# Altium schematic symbol library Centralize.SchLib: 1081 symbols (part 23 of 26)
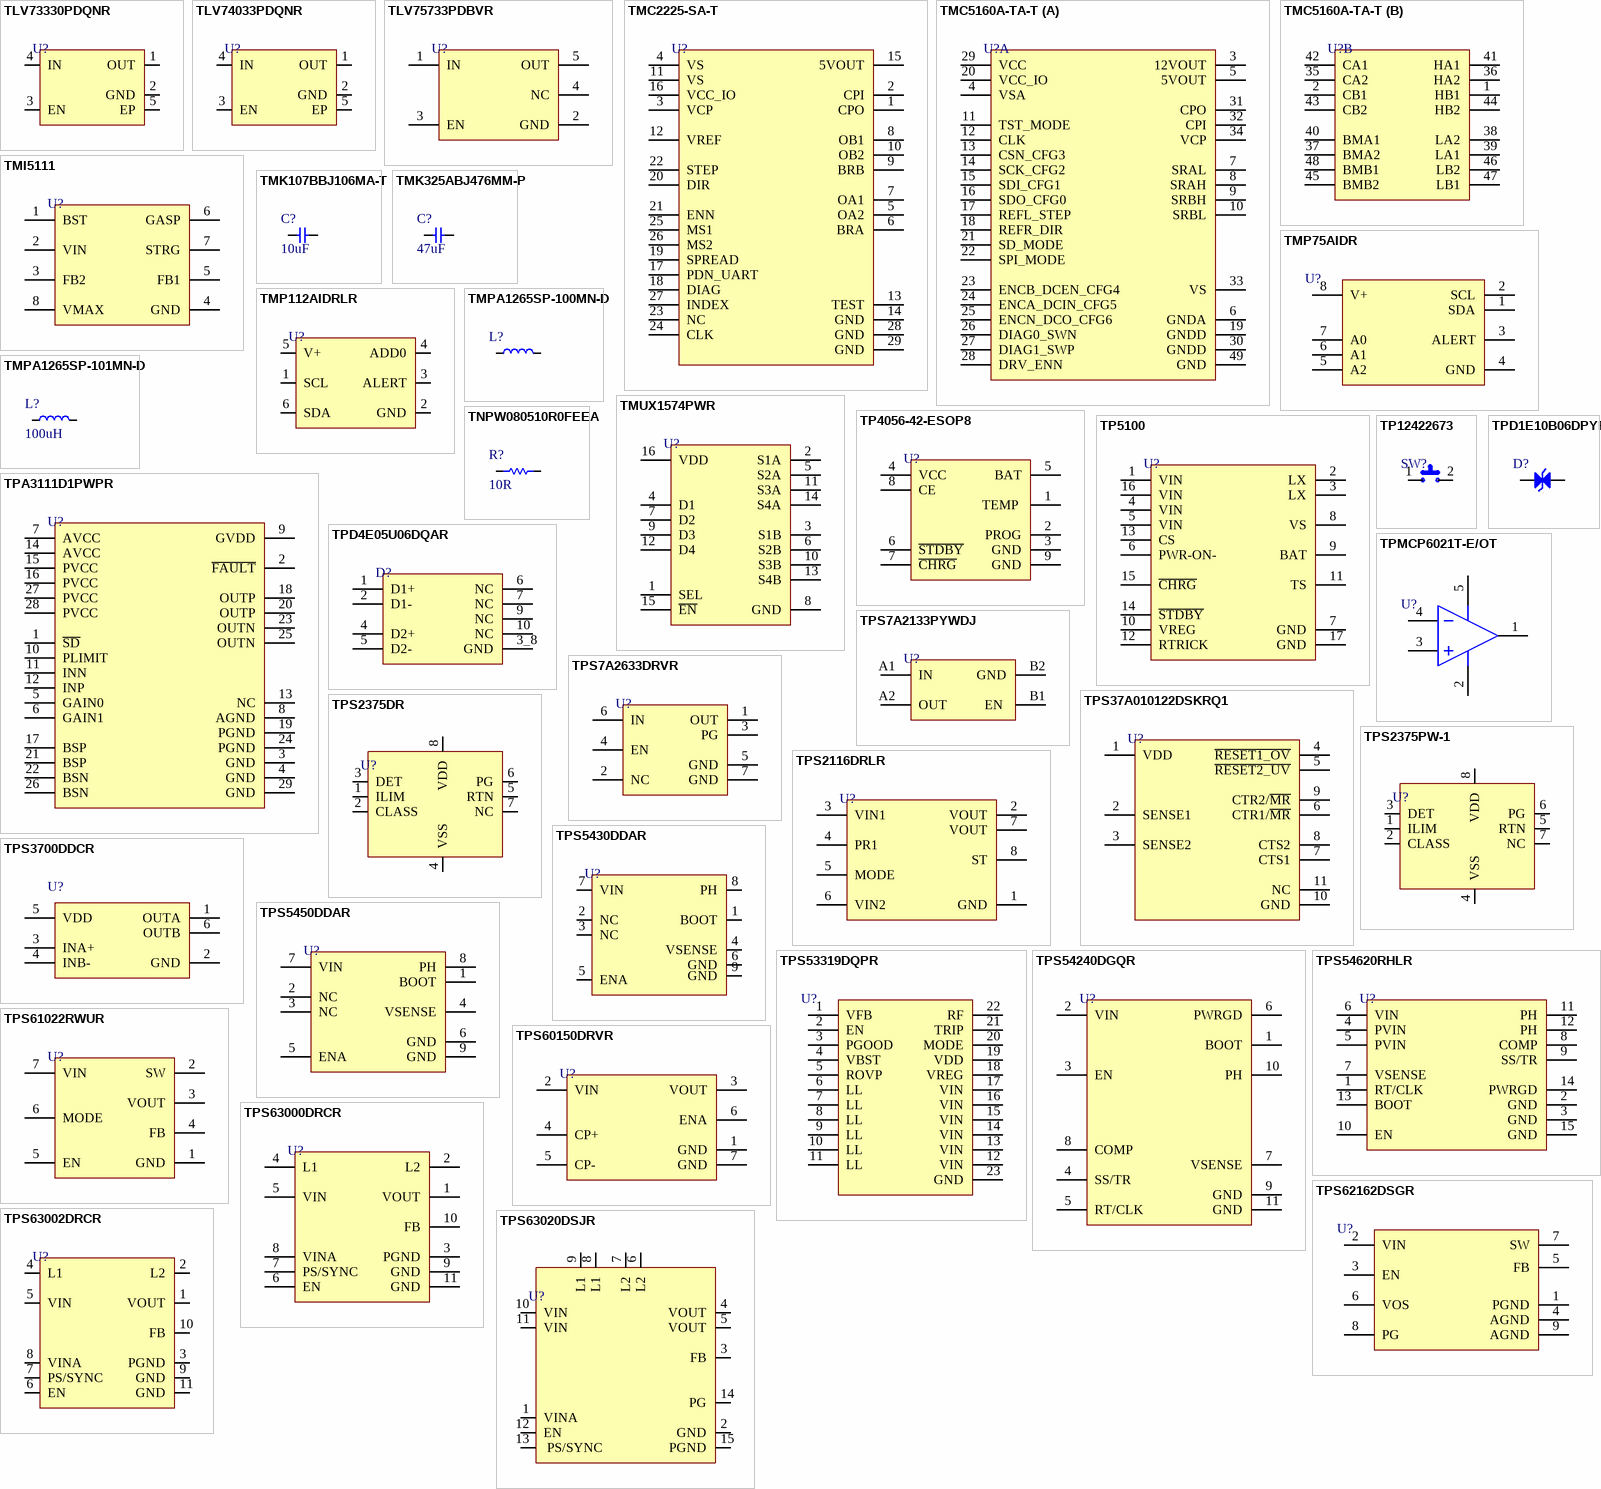
[diagram p69: symbols TLV73330PDQNR to TPS63020DSJR]

## TPS62162DSGR
designator U?
Buck Switching Regulator IC Positive Fixed 3.3V 1 Output 1A 8-WFDFN Exposed Pad; Manufacturer: Texas Instruments; Manufacturer Part Number: TPS62162DSGR; Number of Outputs: 1; Max Input Voltage: 17V; Min Input Voltage: 3V; Switching Frequency: 2.25MHz; Synchronous Rectifier: Yes; Quiescent Current: 17uA; Supplier 1: Mouser; RoHS: Yes; Category: Voltage Regulators - Switching; Pricing 1: 1=1.59000, 10=1.44000, 25=1.36000, 50=1.36000, 100=1.16000, 250=1.09000, 500=0.94700, 1000=0.78500, 10000=0.78400 (USD); Case/Package: SOIC; Number of Pins: 8; Contact Plating: Gold; Min Operating Temperature: -40°C; Max Operating Temperature: 125°C; Output Voltage: 3.3V; Packaging: Tape and Reel; Output Current: 1A; Package Quantity: 3000; Max Output Current: 1A; Min Output Voltage: 3.3V; Max Output Voltage: 3.3V; Operating Supply Voltage: 17V; Output Type: Fixed; Output Configuration: Positive; Series: DCS-Control™; Radiation Hardening: No; Lead Free: Lead Free; RoHS Compliant: Yes; ComponentLink1URL: https://datasheet.ciiva.com/2034/tps62161-2034675.pdf?src-supplier=Digi-Key; ComponentLink1Description: https://datasheet.ciiva.com/2034/tps62161-2034675.pdf?src-supplier=Digi-Key; Supplier Part Number 1: 595-TPS62162DSGR; LCSC Part Number: C40256; Item Type: IC
footprint 8-WSON(2x2) (IC REG BUCK 3.3V 1A 8WSON)
pins: 1 PGND, 2 VIN, 3 EN, 4 AGND, 5 FB, 6 VOS, 7 SW, 8 PG, 9 AGND

## TPS63000DRCR
designator U?
IC REG BCK BST ADJ 1.6A 10VSON; Manufacturer: Texas Instruments; Manufacturer Part Number: TPS63000DRCR; Output Voltage: 5.5V; Output Current: 1.2A; Efficiency: 96%; Number of Outputs: 1; Switching Frequency: 1.5MHz; Min Input Voltage: 1.8V; Synchronous Rectifier: Yes; Min Output Voltage: 1.2V; Quiescent Current: 40uA; Topology: Buck-Boost; Output Type: Adjustable; Supplier 1: Digi-Key; RoHS: Yes; Category: Voltage Regulators - Switching; Pricing 1: 1=2.68000, 10=2.40500, 25=2.26840, 100=1.93270, 250=1.81472, 500=1.58788, 1000=1.31567 (USD); Case/Package: VSON; Pins: 10; Weight: 0.000921oz; Min Operating Temperature: -40°C; Max Operating Temperature: 85°C; Packaging: Tape and Reel; Package Quantity: 1; Max Output current: 1.2A; Max Supply Voltage: 5.5V; Max Output Voltage: 5.5V; Series: -; Operating Supply Voltage: 5.5V; Radiation Hardening: No; Reach SVHC Compliant: Yes; Lead Free: Lead Free; RoHS Compliant: Yes; ComponentLink1URL: https://datasheet.ciiva.com/2025/tps63001-2025809.pdf?src-supplier=Digi-Key; ComponentLink1Description: https://datasheet.ciiva.com/2025/tps63001-2025809.pdf?src-supplier=Digi-Key; ComponentLink2URL: https://datasheet.ciiva.com/27052/1525749-27052325.pdf?src-supplier=Jameco; ComponentLink2Description: https://datasheet.ciiva.com/27052/1525749-27052325.pdf?src-supplier=Jameco; ComponentLink3URL: https://datasheet.ciiva.com/41462/001014937-da-01-en-ic-reg-buck-boo-tps63000drcr-vson-10-tid-41462784.pdf?src-supplier=Conrad; ComponentLink3Description: https://datasheet.ciiva.com/41462/001014937-da-01-en-ic-reg-buck-boo-tps63000drcr-vson-10-tid-41462784.pdf?src-supplier=Conrad; ComponentLink4URL: https://datasheet.ciiva.com/2025/tps63001-2025810.pdf?src-supplier=Digi-Key; ComponentLink4Description: https://datasheet.ciiva.com/2025/tps63001-2025810.pdf?src-supplier=Digi-Key; ComponentLink5URL: https://datasheet.ciiva.com/2025/tps63001-2025811.pdf?src-supplier=Digi-Key; ComponentLink5Description: https://datasheet.ciiva.com/2025/tps63001-2025811.pdf?src-supplier=Digi-Key; Supplier Part Number 1: 296-19641-6-ND; LCSC Part Number: C24966; Item Type: IC
footprint 10-VSON (3x3)
pins: 1 VOUT, 2 L2, 3 PGND, 4 L1, 5 VIN, 6 EN, 7 PS/SYNC, 8 VINA, 9 GND, 10 FB, 11 GND

## TPS63002DRCR
designator U?
IC REG BCK BST 5V 1.6A 10VSON; Manufacturer: Texas Instruments; Manufacturer Part Number: TPS63002DRCR; Number of Outputs: 1; Efficiency: 96%; Switching Frequency: 1.5MHz; Max Output current: 1.2A; Max Supply Voltage: 5.5V; Min Input Voltage: 1.8V; Synchronous Rectifier: Yes; Quiescent Current: 30uA; Topology: Buck-Boost; Output Type: Fixed; Output Configuration: Positive; Item Type: DFN-10(3x3); Supplier: Mouser; Supplier Part Number: 595-TPS63002DRCR; RoHS: Yes; Category: Voltage Regulators - Switching; Stock: 5060; Pricing: 1=2.51, 10=2.2, 50=2.2, 100=1.76, 1000=1.24, 10000=1.1 (USD); Case/Package: VSON; Pins: 10; Weight: 0.000921oz; Min Operating Temperature: -40°C; Max Operating Temperature: 85°C; Output Voltage: 5V; Operating Supply Voltage: 5.5V; Output Current: 1.2A; Packaging: Tape and Reel; Package Quantity: 3000; Nominal Output Voltage: 5V; Max Output Voltage: 5V; Min Output Voltage: 5V; Series: -; Reach SVHC Compliant: No; Lead Free: Lead Free; RoHS Compliant: Yes; ComponentLink1URL: https://datasheet.ciiva.com/22684/1831174-22684659.pdf?src-supplier=Element14; ComponentLink1Description: https://datasheet.ciiva.com/22684/1831174-22684659.pdf?src-supplier=Element14; ComponentLink2URL: https://datasheet.ciiva.com/14303/tps63001-14303726.pdf?src-supplier=Avnet; ComponentLink2Description: https://datasheet.ciiva.com/14303/tps63001-14303726.pdf?src-supplier=Avnet; ComponentLink3URL: https://datasheet.ciiva.com/2025/tps63001-2025822.pdf?src-supplier=Digi-Key; ComponentLink3Description: https://datasheet.ciiva.com/2025/tps63001-2025822.pdf?src-supplier=Digi-Key; ComponentLink4URL: https://datasheet.ciiva.com/2025/tps63001-2025821.pdf?src-supplier=Digi-Key; ComponentLink4Description: https://datasheet.ciiva.com/2025/tps63001-2025821.pdf?src-supplier=Digi-Key; ComponentLink5URL: https://datasheet.ciiva.com/2025/tps63001-2025823.pdf?src-supplier=Digi-Key; ComponentLink5Description: https://datasheet.ciiva.com/2025/tps63001-2025823.pdf?src-supplier=Digi-Key; LCSC Part Number: C116655
pins: 1 VOUT, 2 L2, 3 PGND, 4 L1, 5 VIN, 6 EN, 7 PS/SYNC, 8 VINA, 9 GND, 10 FB, 11 GND

## TPS63020DSJR
designator U?
IC REG BUCK-BST ADJ 3.5A 14VSON; Manufacturer: Texas Instruments; Manufacturer Part Number: TPS63020DSJR; Min Supply Voltage: 1.8V; Number of Outputs: 1; Output Voltage: 5.5V; Output Current: 3A; Efficiency: 96%; Switching Frequency: 2.4MHz; Min Output Voltage: 1.2V; Synchronous Rectifier: Yes; Quiescent Current: 50uA; Topology: Buck-Boost; Output Type: Adjustable; Output Configuration: Positive; Supplier: Mouser; Supplier Part Number: 595-TPS63020DSJR; RoHS: Yes; Category: Voltage Regulators - Switching; Stock: 18181; Pricing: 1=2.8, 10=2.43, 50=2.43, 100=2.07, 1000=1.46, 10000=1.36 (USD); Mounting Technology: Surface Mount; Case/Package: VSON; Pins: 14; Min Operating Temperature: -40°C; Max Operating Temperature: 85°C; Package Quantity: 3000; Packaging: Tape and Reel; Min Input Voltage: 1.8V; Max Output current: 3A; Max Supply Voltage: 5.5V; Max Output Voltage: 5.5V; Operating Supply Voltage: 5.5V; Series: -; Supply Current: 50uA; Reach SVHC Compliant: No; Lead Free: Lead Free; RoHS Compliant: Yes; ComponentLink1URL: https://datasheet.ciiva.com/29733/tps63021-29733058.pdf?src-supplier=Digi-Key; ComponentLink1Description: https://datasheet.ciiva.com/29733/tps63021-29733058.pdf?src-supplier=Digi-Key; ComponentLink2URL: https://datasheet.ciiva.com/29733/tps63020-29733142.pdf?src-supplier=Digi-Key; ComponentLink2Description: https://datasheet.ciiva.com/29733/tps63020-29733142.pdf?src-supplier=Digi-Key; ComponentLink3URL: https://datasheet.ciiva.com/3221/tps63020-3221509.pdf?src-supplier=Avnet; ComponentLink3Description: https://datasheet.ciiva.com/3221/tps63020-3221509.pdf?src-supplier=Avnet; LCSC Part Number: C15483; Item Type: IC
footprint 14-VSON (4x3)
pins: 1 VINA, 2 GND, 3 FB, 4 VOUT, 5 VOUT, 6 L2, 7 L2, 8 L1, 9 L1, 10 VIN, 11 VIN, 12 EN, 13  PS/SYNC, 14 PG, 15 PGND

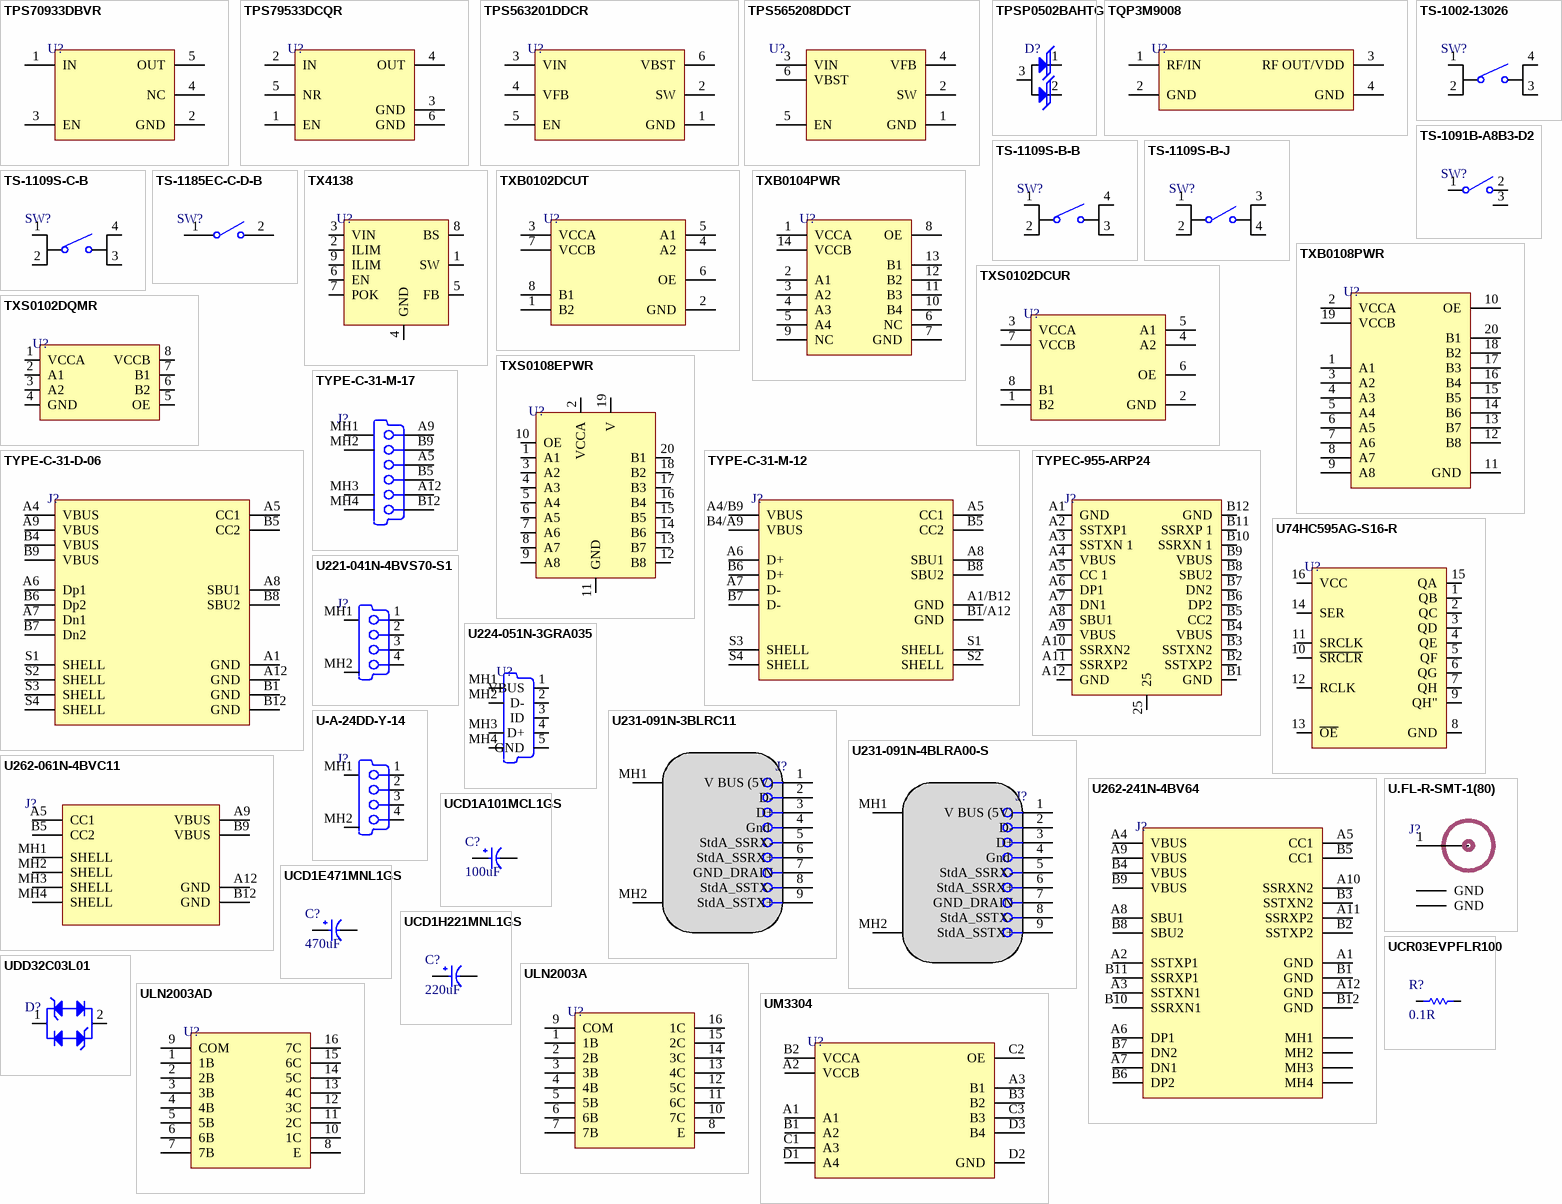
[diagram p43: symbols TPS70933DBVR to UM3304]

## TPS70933DBVR
designator U?
IC REG LINEAR 3.3V 150MA SOT23-5; Manufacturer: Texas Instruments; Manufacturer Part Number: TPS70933DBVR; Package: SOT-23-5; LCSC Part Number: C89347; Item Type: IC
footprint SOT-23-5
pins: 1 IN, 2 GND, 3 EN, 4 NC, 5 OUT

## TPS79533DCQR
designator U?
IC REG LIN 3.3V 500MA SOT223-6; Manufacturer: Texas Instruments; Manufacturer Part Number: TPS79533DCQR; Package: SOT-223-6; LCSC Part Number: C28669; Item Type: IC
footprint SOT-223-6_
pins: 1 EN, 2 IN, 3 GND, 4 OUT, 5 NR, 6 GND

## TPS563201DDCR
designator U?
IC REG BUCK ADJ 3A TSOT23-6; Manufacturer: Texas Instruments; Manufacturer Part Number: TPS563201DDCR; Number of Outputs: 1; Min Input Voltage: 4.5V; Max Input Voltage: 17V; Min Output Voltage: 768mV; Max Output Voltage: 7V; Switching Frequency: 580kHz; Synchronous Rectifier: Yes; Quiescent Current: 400uA; Output Type: Adjustable; Output Configuration: Positive; Supplier 1: Digi-Key; Stock 1: 0; Pricing 1: 1=0.92, 10=0.812, 25=0.7628, 100=0.5781, 250=0.492, 500=0.4674, 1000=0.3567 (USD); Mount: Surface Mount; Case/Package: SOT-23-6; Number of Pins: 6; Min Operating Temperature: -40°C; Max Operating Temperature: 125°C; Packaging: Tape and Reel; Output Current: 3A; Lead Free: Lead Free; ComponentLink1URL: http://www.ti.com/lit/ds/symlink/tps563201.pdf?src-supplier=Digi-Key; ComponentLink1Description: http://www.ti.com/lit/ds/symlink/tps563201.pdf?src-supplier=Digi-Key; ComponentLink2URL: http://www.ti.com/general/docs/suppproductinfo.tsp?distId=10&amp;gotoUrl=http%3A%2F%2Fwww.ti.com%2Flit%2Fgpn%2Ftps563201&src-supplier=Digi-Key; ComponentLink2Description: http://www.ti.com/general/docs/suppproductinfo.tsp?distId=10&amp;gotoUrl=http%3A%2F%2Fwww.ti.com%2Flit%2Fgpn%2Ftps563201&src-supplier=Digi-Key; ComponentLink3URL: http://www.ti.com/lit/gpn/tps563201?src-supplier=Mouser; ComponentLink3Description: http://www.ti.com/lit/gpn/tps563201?src-supplier=Mouser; Supplier Part Number 1: 296-47238-6-ND; LCSC Part Number: C116592; Item Type: IC
footprint SOT-23-6 THIN
pins: 1 GND, 2 SW, 3 VIN, 4 VFB, 5 EN, 6 VBST

## TPS565208DDCT
designator U?
IC REG BUCK ADJ 5A TSOT23-6; Manufacturer: Texas Instruments; Manufacturer Part Number: TPS565208DDCT; Output Type: Adjustable; Output Configuration: Positive; Number of Outputs: 1; Min Input Voltage: 4.5V; Max Input Voltage: 17V; Min Output Voltage: 760mV; Max Output Voltage: 7V; Switching Frequency: 500kHz; Synchronous Rectifier: Yes; Supplier 1: Digi-Key; Stock 1: 1895; Pricing 1: 1=1.75, 10=1.576, 25=1.4868, 100=1.2666 (USD); Mount: Surface Mount; Case/Package: SOT-23-6; Min Operating Temperature: -40°C; Max Operating Temperature: 125°C; Packaging: Tape and Reel; Output Current: 5A; RoHS Compliant: Yes; ComponentLink1URL: http://www.ti.com/lit/ds/symlink/tps565208.pdf?src-supplier=Farnell; ComponentLink1Description: http://www.ti.com/lit/ds/symlink/tps565208.pdf?src-supplier=Farnell; ComponentLink2URL: http://www.ti.com/lit/ds/symlink/tps565208.pdf?src-supplier=Digi-Key; ComponentLink2Description: http://www.ti.com/lit/ds/symlink/tps565208.pdf?src-supplier=Digi-Key; ComponentLink3URL: http://www.ti.com/lit/ds/symlink/tps565208.pdf?src-supplier=Newark; ComponentLink3Description: http://www.ti.com/lit/ds/symlink/tps565208.pdf?src-supplier=Newark; Supplier Part Number 1: 296-47502-6-ND; LCSC Part Number: C2072024; Item Type: IC
footprint SOT-23-6
pins: 1 GND, 2 SW, 3 VIN, 4 VFB, 5 EN, 6 VBST

## TPSP0502BAHTG
designator D?
SOT-23(TO-236) ESD Protection Devices ROHS; Manufacturer: TECH PUBLIC; Manufacturer Part Number: TPSP0502BAHTG; Package: SOT-23(TO-236); LCSC Part Number: C2827647; Item Type: ESD Protection; ComponentLink1Description: LCSC; ComponentLink1URL: https://www.lcsc.com/product-detail/ESD-Protection-Devices_TECH-PUBLIC-TPSP0502BAHTG_C2827647.html
footprint SOT-23 (TRANS NPN 40V 0.6A SOT23)
pins: 1 K, 2 K, 3 A

## TQP3M9008
designator U?
RF Amp Chip Single GP 4GHz 5.25V 4-Pin(3+Tab) SOT-89; Manufacturer: TriQuint; Manufacturer Part Number: TQP3M9008; Operating Supply Voltage: 5V; Number of Channels: 1; Min Supply Voltage: 4.75V; Operating Supply Current: 85mA; Test Frequency: 1.9GHz; Gain: 20.6dB; Operating Frequency: 50 MHz to 4 GHz; Supplier 1: Avnet; RoHS: Yes; Category: Uncategorized; Mount: Surface Mount; Case/Package: SOT-89; Number of Pins: 4; Weight: 0.004603oz; Min Operating Temperature: -40°C; Max Operating Temperature: 85°C; Packaging: Tape and Reel; Package Quantity: 1000; Frequency: 4GHz; Max Supply Voltage: 5.25V; Bandwidth: 1.9GHz; Series: TQP; Radiation Hardening: No; RoHS Compliant: Yes; ComponentLink1URL: https://datasheet.ciiva.com/8154/tqp3m9008-8154011.pdf?src-supplier=Avnet; ComponentLink1Description: https://datasheet.ciiva.com/8154/tqp3m9008-8154011.pdf?src-supplier=Avnet; ComponentLink2URL: https://datasheet.ciiva.com/15129/getdatasheetpartid-698761-15129568.pdf?src-supplier=Verical; ComponentLink2Description: https://datasheet.ciiva.com/15129/getdatasheetpartid-698761-15129568.pdf?src-supplier=Verical; Supplier Part Number 1: TQP3M9008
footprint SOT-89
pins: 1 RF/IN, 2 GND, 3 RF OUT/VDD, 4 GND

## TS-1002-13026
designator SW?
50mA Straight SPST 12V Plugin,6x6mm Tactile Switches ROHS; Manufacturer: XUNPU; Manufacturer Part Number: TS-1002-13026; Package: Plugin,6x6mm; LCSC Part Number: C455107; Item Type: Tactile Switch; ComponentLink1Description: LCSC; ComponentLink1URL: https://www.lcsc.com/product-detail/span-style-background-color-ff0-Tactile-span-Switches_XUNPU-TS-1002-13026_C455107.html
footprint TS-1002-13026
pins: 1, 2, 3, 4

## TS-1091B-A8B3-D2
designator SW?
NO Lying SPST 250gf@±30gf Plugin Tactile Switches ROHS; Manufacturer: Yuandi; Manufacturer Part Number: TS-1091B-A8B3-D2; Package: Plugin; LCSC Part Number: C557914; Item Type: Tactile Switch; ComponentLink1Description: LCSC; ComponentLink1URL: https://www.lcsc.com/product-detail/Tactile-Switches_Yuandi-TS-1091B-A8B3-D2_C557914.html
footprint TS-1091B-A8B3-D2
pins: 1, 2, 3

## TS-1109S-B-B
designator SW?
No NO 50mA 100000 Times 160gf 12V Brick nogging SPST SMD Tactile Switches ROHS; Manufacturer: XKB Connectivity; Manufacturer Part Number: TS-1109S-B-B; Package: SMD; LCSC Part Number: C480315; Item Type: Tactile Switch; ComponentLink1Description: LCSC; ComponentLink1URL: https://www.lcsc.com/product-detail/Tactile-Switches_XKB-Connectivity-TS-1109S-B-B_C480315.html
footprint TS-1109S-B-B
pins: 1, 2, 3, 4

## TS-1109S-B-J
designator SW?
No NO 50mA 4.5mm 100000 160gf 12V -30℃~+85℃ 4.5mm 8mm Black Round Button Brick nogging SPST SMD Tactile Switches ROHS; Manufacturer: XKB Connectivity; Manufacturer Part Number: TS-1109S-B-J; Item Type: Switch; Package: SMD; LCSC Part Number: C480323; ComponentLink1Description: LCSC; ComponentLink1URL: https://www.lcsc.com/product-detail/span-style-background-color-ff0-Tactile-span-Switches_XKB-Connectivity-TS-1109S-B-J_C480323.html
footprint TS-1109S-B-J_
pins: 1, 2, 3, 4

## TS-1109S-C-B
designator SW?
No NO 50mA 4.5mm 100000 260gf 12V -30℃~+85℃ 4.5mm 4.3mm Black Round Button Brick nogging SPST SMD Tactile Switches ROHS; Manufacturer: XKB Connectivity; Manufacturer Part Number: TS-1109S-C-B; Item Type: Switch; Package: Custom; LCSC Part Number: C381037; ComponentLink1Description: LCSC; ComponentLink1URL: https://www.lcsc.com/product-detail/Tactile-Switches_XKB-Connectivity-TS-1109S-C-B_C381037.html
footprint TS-1109S-C-B
pins: 1, 2, 3, 4

## TS-1185EC-C-D-B
designator SW?
3mm 2mm Round Button 50mA Top3.65mm SPST 12V SMD Tactile Switches; Manufacturer: XKB; Manufacturer Part Number: TS-1185EC-C-D-B; Footprint: Custom; ComponentLink1Description: LCSC; ComponentLink1URL: https://lcsc.com/product-detail/Tactile-Switches_XKB-Connectivity-TS-1185EC-C-D-B_C318893.html; LCSC Part Number: C318893
footprint TS-1185EC-C-D-B_
pins: 1, 2

## TX4138
designator U?
Step-down type SOIC-8-EP DC-DC Converters ROHS; Manufacturer: XDS; Manufacturer Part Number: TX4138; Item Type: IC; Package: SOIC-8-EP; LCSC Part Number: C329267; ComponentLink1Description: LCSC; ComponentLink1URL: https://www.lcsc.com/product-detail/DC-DC-Converters_XDS-TX4138_C329267.html
footprint 8-SOIC-EP
pins: 1 SW, 2 ILIM, 3 VIN, 4 GND, 5 FB, 6 EN, 7 POK, 8 BS, 9 ILIM

## TXB0102DCUT
designator U?
IC TRNSLTR BIDIRECTIONAL US8; Manufacturer: Texas Instruments; Manufacturer Part Number: TXB0102DCUT; Propagation Delay: 31ns; Min Supply Voltage: 1.65V; Max Supply Voltage: 5.5V; Data Rate: 100Mbps; Number of Channels: 2; Logic Function: Translator; Turn-On Delay Time: 7.4ns; High Level Output Current: -20uA; Low Level Output Current: 20uA; Output Type: 3-STATE; Output Current: 50mA; Supplier 1: Arrow Electronics; RoHS: Yes; Category: Integrated Circuits (ICs); Stock 1: 10; Pricing 1: 1=0.79330, 10=0.66470, 25=0.65820, 250=0.37450, 500=0.36200, 1000=0.29770, 2500=0.28440 (USD); Mount: Surface Mount; Case/Package: VSSOP; Number of Pins: 8; Weight: 0.000339oz; Contact Plating: Gold; Min Operating Temperature: -40°C; Max Operating Temperature: 85°C; Packaging: Tape and Reel; Package Quantity: 1; Number of Bits: 2; Series: -; Number of Inputs: 2; Length: 2.3mm; Width: 2mm; Height: 0.85mm; Radiation Hardening: No; Lead Free: Lead Free; RoHS Compliant: Yes; REACH SVHC: No SVHC; ComponentLink1URL: https://datasheet.ciiva.com/4226/sces641b-4226901.pdf?src-supplier=Arrow+Electronics; ComponentLink1Description: https://datasheet.ciiva.com/4226/sces641b-4226901.pdf?src-supplier=Arrow+Electronics; ComponentLink2URL: https://datasheet.ciiva.com/15096/getdatasheetpartid-226009-15096242.pdf?src-supplier=Verical; ComponentLink2Description: https://datasheet.ciiva.com/15096/getdatasheetpartid-226009-15096242.pdf?src-supplier=Verical; ComponentLink3URL: https://datasheet.ciiva.com/14287/txb0102-14287498.pdf?src-supplier=Avnet; ComponentLink3Description: https://datasheet.ciiva.com/14287/txb0102-14287498.pdf?src-supplier=Avnet; ComponentLink4URL: https://datasheet.ciiva.com/14287/txb0102-14287370.pdf?src-supplier=Avnet; ComponentLink4Description: https://datasheet.ciiva.com/14287/txb0102-14287370.pdf?src-supplier=Avnet; ComponentLink5URL: https://datasheet.ciiva.com/6619/txb0102-6619255.pdf?src-supplier=Digi-Key; ComponentLink5Description: https://datasheet.ciiva.com/6619/txb0102-6619255.pdf?src-supplier=Digi-Key; ComponentLink6URL: https://datasheet.ciiva.com/6619/txb0102-6619256.pdf?src-supplier=Digi-Key; ComponentLink6Description: https://datasheet.ciiva.com/6619/txb0102-6619256.pdf?src-supplier=Digi-Key; ComponentLink7URL: https://datasheet.ciiva.com/6619/txb0102-6619257.pdf?src-supplier=Digi-Key; ComponentLink7Description: https://datasheet.ciiva.com/6619/txb0102-6619257.pdf?src-supplier=Digi-Key; Supplier Part Number 1: TXB0102DCUT; LCSC Part Number: C2677366; Item Type: IC
footprint VSSOP-8(2x2.3x0.5)
pins: 1 B2, 2 GND, 3 VCCA, 4 A2, 5 A1, 6 OE, 7 VCCB, 8 B1

## TXB0104PWR
designator U?
IC TRANSLATOR BIDIR 14TSSOP; Manufacturer: Texas Instruments; Manufacturer Part Number: TXB0104PWR; Propagation Delay: 31ns; Min Supply Voltage: 1.2V; Max Supply Voltage: 5.5V; Data Rate: 100Mbps; Number of Channels: 4; Turn-On Delay Time: 7.4ns; High Level Output Current: -20uA; Low Level Output Current: 20uA; Quiescent Current: 3.5uA; Output Type: 3-STATE; Nominal Supply Current: 5uA; Number of Circuits: 1; Channel Type: Bidirectional; Supplier 1: Arrow Electronics; RoHS: Yes; Category: Voltage Level Shifters; Stock 1: 1658; Pricing 1: 1=1.50780, 10=1.39060, 25=1.29340, 100=1.11370, 250=1.03790, 500=0.97230, 1000=0.92410 (USD); Mount: Surface Mount; Case/Package: TSSOP; Number of Pins: 14; Weight: 0.002018oz; Min Operating Temperature: -40°C; Max Operating Temperature: 85°C; Packaging: Tape and Reel; Package Quantity: 2000; Logic Function: Translator; Number of Bits: 4; Series: -; Number of Inputs: 4; Output Current: 20uA; Length: 5mm; Width: 4.4mm; Height: 1.15mm; Radiation Hardening: No; Reach SVHC Compliant: Yes; Lead Free: Lead Free; RoHS Compliant: Yes; ComponentLink1URL: https://datasheet.ciiva.com/1508/1633692-1508723.pdf?src-supplier=Element14; ComponentLink1Description: https://datasheet.ciiva.com/1508/1633692-1508723.pdf?src-supplier=Element14; ComponentLink2URL: https://datasheet.ciiva.com/22653/1845221-22653354.pdf?src-supplier=Farnell; ComponentLink2Description: https://datasheet.ciiva.com/22653/1845221-22653354.pdf?src-supplier=Farnell; ComponentLink3URL: https://datasheet.ciiva.com/15096/getdatasheetpartid-48026-15096134.pdf?src-supplier=Verical; ComponentLink3Description: https://datasheet.ciiva.com/15096/getdatasheetpartid-48026-15096134.pdf?src-supplier=Verical; ComponentLink4URL: https://datasheet.ciiva.com/1508/1849862-1508724.pdf?src-supplier=Element14; ComponentLink4Description: https://datasheet.ciiva.com/1508/1849862-1508724.pdf?src-supplier=Element14; ComponentLink5URL: https://datasheet.ciiva.com/46395/1864432-46395886.pdf?src-supplier=Element14; ComponentLink5Description: https://datasheet.ciiva.com/46395/1864432-46395886.pdf?src-supplier=Element14; ComponentLink6URL: https://datasheet.ciiva.com/1899/txb0104-1899515.pdf?src-supplier=Digi-Key; ComponentLink6Description: https://datasheet.ciiva.com/1899/txb0104-1899515.pdf?src-supplier=Digi-Key; ComponentLink7URL: https://datasheet.ciiva.com/1899/txb0104-1899514.pdf?src-supplier=Digi-Key; ComponentLink7Description: https://datasheet.ciiva.com/1899/txb0104-1899514.pdf?src-supplier=Digi-Key; ComponentLink8URL: https://datasheet.ciiva.com/1899/txb0104-1899516.pdf?src-supplier=Digi-Key; ComponentLink8Description: https://datasheet.ciiva.com/1899/txb0104-1899516.pdf?src-supplier=Digi-Key; ComponentLink9URL: https://datasheet.ciiva.com/14287/txb0104-14287375.pdf?src-supplier=Avnet; ComponentLink9Description: https://datasheet.ciiva.com/14287/txb0104-14287375.pdf?src-supplier=Avnet; Supplier Part Number 1: TXB0104PWR; LCSC Part Number: C60708; Item Type: IC
footprint 14-TSSOP
pins: 1 VCCA, 2 A1, 3 A2, 4 A3, 5 A4, 6 NC, 7 GND, 8 OE, 9 NC, 10 B4, 11 B3, 12 B2, 13 B1, 14 VCCB

## TXB0108PWR
designator U?
IC 8-BIT TRNSTR 15KV ESD 20TSSOP; Manufacturer: Texas Instruments; Manufacturer Part Number: TXB0108PWR; Max Supply Voltage: 5.5V; Min Supply Voltage: 1.2V; Propagation Delay: 4ns; Output Current: 20uA; Data Rate: 100Mbps; Number of Channels: 8; Logic Function: Translator; High Level Output Current: -20uA; Turn-On Delay Time: 9.5ns; Quiescent Current: 3.5uA; Output Type: 3-STATE; Channel Type: Bidirectional; Number of Circuits: 1; Rise Time: 7.3ns; Supplier 1: Mouser; RoHS: Yes; Category: Logic ICs; Stock 1: 134319; Pricing 1: 1=1.73, 10=1.55, 50=1.47, 100=1.21, 1000=0.789, 10000=0.694 (USD); Mounting Technology: Surface Mount; Case/Package: TSSOP; Pins: 20; Weight: 0.002716oz; Min Operating Temperature: -40°C; Max Operating Temperature: 85°C; Packaging: Tape and Reel; Number of Bits: 8; Low Level Output Current: 20uA; Series: -; Package Quantity: 2000; Number of Inputs: 8; Termination: SMD/SMT; Length: 6.5mm; Width: 4.4mm; Height: 1.15mm; Radiation Hardening: No; Lead Free: Lead Free; RoHS Compliant: Yes; Reach SVHC Compliant: No; ComponentLink1URL: https://datasheet.ciiva.com/1508/1789049-1508727.pdf?src-supplier=Element14; ComponentLink1Description: https://datasheet.ciiva.com/1508/1789049-1508727.pdf?src-supplier=Element14; ComponentLink2URL: https://datasheet.ciiva.com/22653/1633674-22653426.pdf?src-supplier=Farnell; ComponentLink2Description: https://datasheet.ciiva.com/22653/1633674-22653426.pdf?src-supplier=Farnell; ComponentLink3URL: https://datasheet.ciiva.com/1628/txb0108-1628712.pdf?src-supplier=Newark; ComponentLink3Description: https://datasheet.ciiva.com/1628/txb0108-1628712.pdf?src-supplier=Newark; ComponentLink4URL: https://datasheet.ciiva.com/4834/sces643e-127095-4834434.pdf?src-supplier=Mouser; ComponentLink4Description: https://datasheet.ciiva.com/4834/sces643e-127095-4834434.pdf?src-supplier=Mouser; ComponentLink5URL: https://datasheet.ciiva.com/15096/getdatasheetpartid-189652-15096226.pdf?src-supplier=Verical; ComponentLink5Description: https://datasheet.ciiva.com/15096/getdatasheetpartid-189652-15096226.pdf?src-supplier=Verical; ComponentLink6URL: https://datasheet.ciiva.com/28499/1811182-28499660.pdf?src-supplier=Element14; ComponentLink6Description: https://datasheet.ciiva.com/28499/1811182-28499660.pdf?src-supplier=Element14; ComponentLink7URL: https://datasheet.ciiva.com/1899/txb0108-1899608.pdf?src-supplier=Digi-Key; ComponentLink7Description: https://datasheet.ciiva.com/1899/txb0108-1899608.pdf?src-supplier=Digi-Key; ComponentLink8URL: https://datasheet.ciiva.com/1899/txb0108-1899607.pdf?src-supplier=Digi-Key; ComponentLink8Description: https://datasheet.ciiva.com/1899/txb0108-1899607.pdf?src-supplier=Digi-Key; ComponentLink9URL: https://datasheet.ciiva.com/1899/txb0108-1899609.pdf?src-supplier=Digi-Key; ComponentLink9Description: https://datasheet.ciiva.com/1899/txb0108-1899609.pdf?src-supplier=Digi-Key; ComponentLink10URL: https://datasheet.ciiva.com/14287/txb0108-14287509.pdf?src-supplier=Avnet; ComponentLink10Description: https://datasheet.ciiva.com/14287/txb0108-14287509.pdf?src-supplier=Avnet; ComponentLink11URL: https://datasheet.ciiva.com/48701/001073833-da-01-en-ic-8-bit-trnstr-txb0108pwr-tssop-20-tid-48701979.pdf?src-supplier=Conrad; ComponentLink11Description: https://datasheet.ciiva.com/48701/001073833-da-01-en-ic-8-bit-trnstr-txb0108pwr-tssop-20-tid-48701979.pdf?src-supplier=Conrad; Supplier Part Number 1: 595-TXB0108PWR; LCSC Part Number: C53406; Item Type: IC
footprint TSSOP-20
pins: 1 A1 "Input/output 1. Referenced to VCCA.", 2 VCCA "A-port supply voltage. 1.1 V =< VCCA =< 3.6 V, VCCA =< VCCB.", 3 A2 "Input/output 2. Referenced to VCCA.", 4 A3 "Input/output 3. Referenced to VCCA.", 5 A4 "Input/output 4. Referenced to VCCA.", 6 A5 "Input/output 5. Referenced to VCCA.", 7 A6 "Input/output 6. Referenced to VCCA.", 8 A7 "Input/output 7. Referenced to VCCA.", 9 A8 "Input/output 8. Referenced to VCCA.", 10 OE "Output enable. Pull OE low to place all outputs in 3-state mode. Referenced to VCCA.", 11 GND "Ground", 12 B8 "Input/output 8. Referenced to VCCB.", 13 B7 "Input/output 7. Referenced to VCCB.", 14 B6 "Input/output 6. Referenced to VCCB.", 15 B5 "Input/output 5. Referenced to VCCB.", 16 B4 "Input/output 4. Referenced to VCCB.", 17 B3 "Input/output 3. Referenced to VCCB.", 18 B2 "Input/output 2. Referenced to VCCB.", 19 VCCB "B-port supply voltage. 1.65 V =< VCCB =< 5.5 V.", 20 B1 "Input/output 1. Referenced to VCCB."

## TXS0102DCUR
designator U?
IC TRANSLTR BIDIRECTIONAL 8VSSOP; Manufacturer: Texas Instruments; Manufacturer Part Number: TXS0102DCUR; Package Body Material: Plastic; Interface IC Type: INTERFACE CIRCUIT; Channels: 1; Max Supply Voltage: 3.6V; Min Supply Voltage: 1.65V; Nominal Supply Voltage: 1.8V; Power Supplies: 1.8/3.3,2.5/5V; Supply Voltage1-Max: 5.5V; Supply Voltage1-Min: 2.3V; Supply Voltage1-Nom: 2.5V; Qualification Status: Not Qualified; Supplier 1: Mouser; RoHS: Yes; Category: Voltage Level Shifters; Stock 1: 246792; Pricing 1: 1=0.93000, 10=0.83300, 50=0.79000, 100=0.64900, 1000=0.42300, 10000=0.40900 (USD); Case/Package: VSSOP; Pins: 8; Package Shape: Rectangular; Terminal Finish: Nickel; Min Operating Temperature: -40°C; Max Operating Temperature: 85°C; JESD-609 Code: e4; JESD-30 Code: R-PDSO-G8; Moisture Sensitivity Level: 1; Package Style: SMALL OUTLINE, VERY THIN PROFILE, SHRINK PITCHMeter; Peak Reflow Temperature (Cel): 260°C; Surface Mount: Yes; Terminal Form: Gull Wing; Terminal Position: DUAL; Length: 2.3mm; Width: 2mm; Height - Seated (Max): 0.9mm; Terminal Pitch: 0.5mm; Temperature Grade: INDUSTRIAL; Reach SVHC Compliant: Yes; RoHS Compliant: Yes; ComponentLink1URL: https://www.ti.com:443/lit/ds/symlink/txs0102.pdf?src-supplier=IHS+Markit; ComponentLink1Description: https://www.ti.com:443/lit/ds/symlink/txs0102.pdf?src-supplier=IHS+Markit; ComponentLink2URL: https://datasheet.ciiva.com/22653/1846850-22653373.pdf?src-supplier=Farnell; ComponentLink2Description: https://datasheet.ciiva.com/22653/1846850-22653373.pdf?src-supplier=Farnell; ComponentLink3URL: https://datasheet.ciiva.com/15096/getdatasheetpartid-118249-15096172.pdf?src-supplier=Verical; ComponentLink3Description: https://datasheet.ciiva.com/15096/getdatasheetpartid-118249-15096172.pdf?src-supplier=Verical; ComponentLink4URL: https://datasheet.ciiva.com/1508/1857232-1508821.pdf?src-supplier=Element14; ComponentLink4Description: https://datasheet.ciiva.com/1508/1857232-1508821.pdf?src-supplier=Element14; ComponentLink5URL: https://datasheet.ciiva.com/28499/1863639-28499676.pdf?src-supplier=Element14; ComponentLink5Description: https://datasheet.ciiva.com/28499/1863639-28499676.pdf?src-supplier=Element14; ComponentLink6URL: https://datasheet.ciiva.com/46395/1863639-46395871.pdf?src-supplier=Element14; ComponentLink6Description: https://datasheet.ciiva.com/46395/1863639-46395871.pdf?src-supplier=Element14; ComponentLink7URL: https://datasheet.ciiva.com/1899/txs0102-1899369.pdf?src-supplier=Digi-Key; ComponentLink7Description: https://datasheet.ciiva.com/1899/txs0102-1899369.pdf?src-supplier=Digi-Key; ComponentLink8URL: https://datasheet.ciiva.com/1899/txs0102-1899368.pdf?src-supplier=Digi-Key; ComponentLink8Description: https://datasheet.ciiva.com/1899/txs0102-1899368.pdf?src-supplier=Digi-Key; ComponentLink9URL: https://datasheet.ciiva.com/1899/txs0102-1899370.pdf?src-supplier=Digi-Key; ComponentLink9Description: https://datasheet.ciiva.com/1899/txs0102-1899370.pdf?src-supplier=Digi-Key; ComponentLink10URL: https://datasheet.ciiva.com/14287/txs0102-14287516.pdf?src-supplier=Avnet; ComponentLink10Description: https://datasheet.ciiva.com/14287/txs0102-14287516.pdf?src-supplier=Avnet; Supplier Part Number 1: 595-TXS0102DCUR; LCSC Part Number: C53434; Item Type: IC
footprint 8-VSSOP
pins: 1 B2, 2 GND, 3 VCCA, 4 A2, 5 A1, 6 OE, 7 VCCB, 8 B1

## TXS0102DQMR
designator U?
IC TRANSLTR BIDIRECTIONAL 8X2SON; Manufacturer: Texas Instruments; Manufacturer Part Number: TXS0102DQMR; Supplier: Mouser; Supplier Part Number: 595-TXS0102DQMR; RoHS: Yes; Category: Voltage Level Shifters; Stock: 19460; Pricing: 1=0.85, 10=0.763, 50=0.763, 100=0.595, 1000=0.388, 10000=0.333 (USD); ComponentLink1URL: https://datasheet.ciiva.com/15096/getdatasheetpartid-544149-15096438.pdf?src-supplier=Verical; ComponentLink1Description: https://datasheet.ciiva.com/15096/getdatasheetpartid-544149-15096438.pdf?src-supplier=Verical; ComponentLink2URL: https://datasheet.ciiva.com/1900/txs0102-1900696.pdf?src-supplier=Digi-Key; ComponentLink2Description: https://datasheet.ciiva.com/1900/txs0102-1900696.pdf?src-supplier=Digi-Key; ComponentLink3URL: https://datasheet.ciiva.com/1900/txs0102-1900697.pdf?src-supplier=Digi-Key; ComponentLink3Description: https://datasheet.ciiva.com/1900/txs0102-1900697.pdf?src-supplier=Digi-Key; ComponentLink4URL: https://datasheet.ciiva.com/1900/txs0102-1900698.pdf?src-supplier=Digi-Key; ComponentLink4Description: https://datasheet.ciiva.com/1900/txs0102-1900698.pdf?src-supplier=Digi-Key; LCSC Part Number: C108605; Item Type: IC
footprint 8-X2SON (1.8x1.2)
pins: 1 VCCA, 2 A1, 3 A2, 4 GND, 5 OE, 6 B2, 7 B1, 8 VCCB

## TXS0108EPWR
designator U?
IC TRANSLATOR BIDIR 20TSSOP; Manufacturer: Texas Instruments; Manufacturer Part Number: TXS0108EPWR; Package: 20-TSSOP; LCSC Part Number: C17206; Item Type: IC; ComponentLink1Description: LCSC; ComponentLink1URL: https://www.lcsc.com/product-detail/Translators-Level-Shifters_Texas-Instruments-TXS0108EPWR_C17206.html
footprint TSSOP-20
pins: 1 A1, 2 VCCA, 3 A2, 4 A3, 5 A4, 6 A5, 7 A6, 8 A7, 9 A8, 10 OE, 11 GND, 12 B8, 13 B7, 14 B6, 15 B5, 16 B4, 17 B3, 18 B2, 19 V, 20 B1

## TYPE-C-31-D-06
designator J?
1 Brick nogging 16 Female -25℃~+85℃ Type-C SMD USB Connectors ROHS; Manufacturer Part Number: TYPE-C-31-D-06; Manufacturer: Korean Hroparts Elec; Package: Custom; LCSC Part Number: C2689964; Item Type: USB Connector; ComponentLink1Description: LCSC; ComponentLink1URL: https://www.lcsc.com/product-detail/USB-Connectors_Korean-Hroparts-Elec-TYPE-C-31-D-06_C2689964.html
footprint TYPE-C-31-D-06
pins: A1 GND (power), A4 VBUS (power), A5 CC1, A6 Dp1, A7 Dn1, A8 SBU1, A9 VBUS (power), A12 GND (power), B1 GND (power), B4 VBUS (power), B5 CC2, B6 Dp2, B7 Dn2, B8 SBU2, B9 VBUS (power), B12 GND (power), S1 SHELL, S2 SHELL, S3 SHELL, S4 SHELL

## TYPE-C-31-M-12
designator J?
250mA 1 16 Female Type-C SMD USB Connectors ROHS; Manufacturer: Korean Hroparts Elec; Manufacturer Part Number: TYPE-C-31-M-12; ComponentLink1Description: LCSC; ComponentLink1URL: https://www.lcsc.com/product-detail/USB-Connectors_Korean-Hroparts-Elec-TYPE-C-31-M-12_C165948.html; Footprint: Custom; LCSC Part Number: C165948; Item Type: USB Connector
footprint TYPE-C-31-M-12_
pins: A1/B12 GND (power), A4/B9 VBUS (power), A5 CC1, A6 D+, A7 D-, A8 SBU1, B1/A12 GND (power), B4/A9 VBUS (power), B5 CC2, B6 D+, B7 D-, B8 SBU2, S1 SHELL, S2 SHELL, S3 SHELL, S4 SHELL

## TYPE-C-31-M-17
designator J?
Receptacle USB - Type C 6 - USB Connectors ROHS; Manufacturer: Koren Hroparts Elec; Manufacturer Part Number: Type-C-31-M-17; Footprint: Custom; ComponentLink1Description: LCSC; ComponentLink1URL: https://www.lcsc.com/product-detail/USB-Connectors_Korean-Hroparts-Elec-TYPE-C-31-M-17_C283540.html
footprint TYPE-C-31-M-17_
pins: A5 CC1 "USB Data + [Green]", A9 VBUS  "USB Vcc [Red]", A12 GND "Ground [Black]", B5 CC2 "Not Connected (or joined to pin 5 via resistor)", B9 VBUS "USB Data - [White]", B12 GND "Ground [Black]", MH1 Tab "Shell", MH2 Tab "Shell", MH3 Tab "Shell", MH4 Tab "Shell"

## TYPEC-955-ARP24
designator J?
USB 3.1 3A 1 260℃ Board Edge, Straddle Mount 24P Male -25℃~+85℃ Type-C SMD USB Connectors ROHS; Manufacturer: XUNPU; Manufacturer Part Number: TYPEC-955-ARP24; Item Type: Type-C Connector; Package: SMD; LCSC Part Number: C2895018
footprint TYPEC-955-ARP24
pins: 25, A1 GND, A2 SSTXP1, A3 SSTXN 1, A4 VBUS, A5 CC 1, A6 DP1, A7 DN1, A8 SBU1, A9 VBUS, A10 SSRXN2, A11 SSRXP2, A12 GND, B1 GND, B2 SSTXP2, B3 SSTXN2, B4 VBUS, B5 CC2, B6 DP2, B7 DN2, B8 SBU2, B9 VBUS, B10 SSRXN 1, B11 SSRXP 1, B12 GND

## U74HC595AG-S16-R
designator U?
SOP-16 Shifting Register ROHS; Manufacturer: UTC(Unisonic Tech); Manufacturer Part Number: U74HC595AG-S16-R; Item Type: IC; Package: SOP-16; LCSC Part Number: C87300; ComponentLink1Description: LCSC; ComponentLink1URL: https://www.lcsc.com/product-detail/Shifting-Register_UTC-Unisonic-Tech-U74HC595AG-S16-R_C87300.html
footprint SOP-16_150mil
pins: 1 QB, 2 QC, 3 QD, 4 QE, 5 QF, 6 QG, 7 QH, 8 GND, 9 QH", 10 ~{SRCLR}, 11 SRCLK, 12 RCLK, 13 ~{OE}, 14 SER, 15 QA, 16 VCC

## U221-041N-4BVS70-S1
designator J?
1A USB 2.0 1 235℃ Surface Mount 4 Female -20℃~+85℃ Gold Copper Alloy Type-A SMD USB Connectors ROHS; Manufacturer: XKB Connectivity; Manufacturer Part Number: U221-041N-4BVS70-S1; Supplier 1: LCSC; RoHS: No; Category: Uncategorized; Supplier Part Number 1: C2942998; ComponentLink1Description: LCSC; ComponentLink1URL: https://www.lcsc.com/product-detail/USB-Connectors_XKB-Connectivity-U221-041N-4BVS70-S1_C2942998.html; LCSC Part Number: C2942998
footprint U221-041N-4BVS70-S1_
pins: 1 VBUS, 2 D- "USB Data - [White]", 3 D+ "USB Data + [Green]", 4 GND, MH1 Tab "Shell", MH2 Tab "Shell"

## U224-051N-3GRA035
designator U?
USB 2.0 5A 1 235℃ Sink board 4 Female -25℃~+85℃ Gold Copper Alloy Type-A Plugin USB Connectors ROHS; Manufacturer: XKB Connectivity; Manufacturer Part Number: U224-051N-3GRA035; Package: Plugin; LCSC Part Number: C2689740; Item Type: USB Connector; ComponentLink1Description: LCSC; ComponentLink1URL: https://www.lcsc.com/product-detail/USB-Connectors_XKB-Connectivity-U224-051N-3GRA035_C2689740.html
footprint U224-051N-3GRA035
pins: 1 VBUS, 2 D- "USB Data - [White]", 3 ID "USB Data + [Green]", 4 D+, 5 GND, MH1 Tab "Shell", MH2 Tab "Shell", MH3 Tab "Shell", MH4 Tab "Shell"

## U231-091N-3BLRC11
designator J?
USB 3.0 3A 1 235℃ Shrouded 9 Female -40℃~+85℃ Gold Brass Type-A Plugin USB Connectors ROHS; Manufacturer: XKB Connectivity; Manufacturer Part Number: U231-091N-3BLRC11; Package: Plugin; LCSC Part Number: C2880594; Item Type: USB Connector; ComponentLink1Description: LCSC; ComponentLink1URL: https://www.lcsc.com/product-detail/span-style-background-color-ff0-USB-span-span-style-background-color-ff0-Connectors-span_XKB-Connectivity-U231-091N-3BLRC11_C2880594.html
footprint U231-091N-3BLRC11
pins: 1 V BUS (5V) "USB Vcc [Red]", 2 D- "USB Data - [White]", 3 D+ "USB Data + [Green]", 4 Gnd  "Ground for Power Button", 5 StdA_SSRX- "SUPERSPEED RECEIVER DIFFERENTIAL PAIR", 6 StdA_SSRX+ "SUPERSPEED RECEIVER DIFFERENTIAL PAIR", 7 GND_DRAIN "GROUND FOR SIGNAL RETURN", 8 StdA_SSTX- "SUPERSPEED TRANSMITTER DIFFERENTIAL PAIR", 9 StdA_SSTX+ "SUPERSPEED TRANSMITTER DIFFERENTIAL PAIR", MH1 Tab "Shell", MH2 Tab "Shell"

## U231-091N-4BLRA00-S
designator J?
USB 3.0 1.8A 1 260℃ Surface Mount 9 Female -40℃~+85℃ Gold Copper Alloy Type-A SMD USB Connectors ROHS; Manufacturer: XKB Connectivity; Manufacturer Part Number: U231-091N-4BLRA00-S; Footprint: Custom; ComponentLink1Description: LCSC; ComponentLink1URL: https://lcsc.com/product-detail/USB-Connectors_XKB-Connectivity-U231-091N-4BLRA00-S_C2880618.html; LCSC Part Number: C2880618
footprint U231-091N-4BLRA00-S_ (USB 3.0 1 Surface Mount 9 Female -40?~+85? Type-A SMD USB Connectors ROHS)
pins: 1 V BUS (5V) "USB Vcc [Red]", 2 D- "USB Data - [White]", 3 D+ "USB Data + [Green]", 4 Gnd  "Ground for Power Button", 5 StdA_SSRX- "SUPERSPEED RECEIVER DIFFERENTIAL PAIR", 6 StdA_SSRX+ "SUPERSPEED RECEIVER DIFFERENTIAL PAIR", 7 GND_DRAIN "GROUND FOR SIGNAL RETURN", 8 StdA_SSTX- "SUPERSPEED TRANSMITTER DIFFERENTIAL PAIR", 9 StdA_SSTX+ "SUPERSPEED TRANSMITTER DIFFERENTIAL PAIR", MH1 Tab "Shell", MH2 Tab "Shell"

## U262-061N-4BVC11
designator J?
USB 3.1 1 Surface Mount 6 Female -25℃~+85℃ Type-C SMD USB Connectors ROHS; Manufacturer: XKB; Manufacturer Part Number: U262-061N-4BVC11; Footprint: Custom; ComponentLink1Description: LCSC; ComponentLink1URL: https://www.lcsc.com/product-detail/span-style-background-color-ff0-USB-span-Connectors_XKB-Connectivity-U262-061N-4BVC11_C2764612.html; LCSC Part Number: C2764612; Item Type: USB Connector
footprint U262-061N-4BVC11
pins: A5 CC1 (power), A9 VBUS (power), A12 GND, B5 CC2 (power), B9 VBUS (power), B12 GND, MH1 SHELL, MH2 SHELL, MH3 SHELL, MH4 SHELL

## U262-241N-4BV64
designator J?
5A USB 3.1 1 260℃ Surface Mount 24 Female Copper Alloy Type-C SMD USB Connectors ROHS; Manufacturer: XKB Connectivity; Manufacturer Part Number: U262-241N-4BV64; Package: Custom; LCSC Part Number: C388660; ComponentLink1Description: LCSC; ComponentLink1URL: https://www.lcsc.com/product-detail/span-style-background-color-ff0-USB-span-Connectors_XKB-Connectivity-U262-241N-4BV64_C388660.html
footprint U262-241N-4BV64_
pins: A1 GND, A2 SSTXP1, A3 SSTXN1, A4 VBUS, A5 CC1, A6 DP1, A7 DN1, A8 SBU1, A9 VBUS, A10 SSRXN2, A11 SSRXP2, A12 GND, B1 GND, B2 SSTXP2, B3 SSTXN2, B4 VBUS, B5 CC1, B6 DP2, B7 DN2, B8 SBU2, B9 VBUS, B10 SSRXN1, B11 SSRXP1, B12 GND, MH1, MH2, MH3, MH4

## U-A-24DD-Y-14
designator J?
USB 2.0 3A 1 Shrouded 4 Female Type-A Plugin USB Connectors ROHS; Manufacturer: Korean Hroparts Elec; Manufacturer Part Number: U-A-24DD-Y-14; Item Type: USB A Connector; Package: Plugin; LCSC Part Number: C2689985; ComponentLink1Description: LCSC; ComponentLink1URL: https://www.lcsc.com/product-detail/USB-Connectors_Korean-Hroparts-Elec-U-A-24DD-Y-14_C2689985.html
footprint U-A-24DD-Y-14
pins: 1 VBUS, 2 D- "USB Data - [White]", 3 D+ "USB Data + [Green]", 4 GND, MH1 Tab "Shell", MH2 Tab "Shell"

## U.FL-R-SMT-1(80)
designator J?
CONN U.FL RCPT STR 50 OHM SMD; Manufacturer: Hirose; Manufacturer Part Number: U.FL-R-SMT-1(80); Item Type: UFL Connector; Supplier 1: Future Electronics; Stock 1: 1272; Pricing 1: 1=1.07, 500=0.785, 1500=0.74, 2500=0.72, 5000=0.695 (USD); Case/Package: SMD/SMT; Package Quantity: 10000; Packaging: Tape and Reel; Lead Free: Lead Free; ComponentLink1URL: https://www.hirose.com/product/en/download_file/key_name/U.FL-R-SMT-1%2880%29/category/Specification%20Sheet/doc_file_id/37638/?file_category_id=9&item_id=03310472280&is_series=&src-supplier=Digi-Key; ComponentLink1Description: https://www.hirose.com/product/en/download_file/key_name/U.FL-R-SMT-1%2880%29/category/Specification%20Sheet/doc_file_id/37638/?file_category_id=9&item_id=03310472280&is_series=&src-supplier=Digi-Key; ComponentLink2URL: http://www.mouser.com/ds/2/185/U.FL_catalog-939761.pdf?src-supplier=Mouser; ComponentLink2Description: http://www.mouser.com/ds/2/185/U.FL_catalog-939761.pdf?src-supplier=Mouser; Supplier Part Number 1: U.FL-R-SMT-1(80)-CUTT; LCSC Part Number: C88374
footprint U.FL-R-SMT-1(80)_
pins: 1 RF_IN, 2 GND, 3 GND

## UCD1A101MCL1GS
designator C?, comment 100uF
CAP ALUM 100UF 20% 10V SMD; Manufacturer: Nichicon; Manufacturer Part Number: UCD1A101MCL1GS; Ripple Current: 240mA; Impedance: 360mR; Leakage Current: 10uA; Polarity: Polar; Dissipation Factor: 0.19%; Life (Hours): 2000Hour; Item Type: Capacitor; Supplier 1: Digi-Key; RoHS: Yes; Category: Aluminum Electrolytic Capacitors; Stock 1: 6029; Pricing 1: 1=0.51000, 10=0.35900, 50=0.27160, 100=0.23660, 500=0.17526 (USD); Mount: Surface Mount; Case/Package: Radial; Min Operating Temperature: -55°C; Max Operating Temperature: 105°C; Capacitance: 100uF; Packaging: Tape and Reel; Package Quantity: 1000; Voltage Rating: 10V; Voltage Rating (DC): 10V; Tolerance: 20%; Termination: SMD/SMT; Voltage: 10V; Series: CD; Construction: Cylindrical; Diameter: 6.3mm; Length: 5.8mm; Height: 5.8mm; Height - Seated (Max): 0.24inch; Radiation Hardening: No; RoHS Compliant: Yes; ComponentLink1URL: https://datasheet.ciiva.com/11776/0900766b80ebdadd-11776792.pdf?src-supplier=RSComponents; ComponentLink1Description: https://datasheet.ciiva.com/11776/0900766b80ebdadd-11776792.pdf?src-supplier=RSComponents; ComponentLink2URL: https://datasheet.ciiva.com/111/e-cd-111628.pdf?src-supplier=Digi-Key; ComponentLink2Description: https://datasheet.ciiva.com/111/e-cd-111628.pdf?src-supplier=Digi-Key; ComponentLink3URL: https://datasheet.ciiva.com/11686/e-cd-11686168.pdf?src-supplier=Avnet; ComponentLink3Description: https://datasheet.ciiva.com/11686/e-cd-11686168.pdf?src-supplier=Avnet; Supplier Part Number 1: 493-14563-1-ND; LCSC Part Number: C340720
footprint UCD1A101MCL1GS
pins: 1, 2

## UCD1E471MNL1GS
designator C?, comment 470uF
CAP ALUM 470UF 20% 25V SMD; Manufacturer: Nichicon; Manufacturer Part Number: UCD1E471MNL1GS; Ripple Current: 850mA; Impedance: 80mR; Leakage Current: 3uA; Life (Hours): 5000Hour; Dissipation Factor: 0.14%; Supplier 1: Digi-Key; Stock 1: 0; Pricing 1: 1=0.96, 10=0.708, 50=0.566, 100=0.4852 (USD); Mount: Surface Mount,PCB; Case/Package: Radial; Min Operating Temperature: -55°C; Max Operating Temperature: 105°C; Capacitance: 470uF; Tolerance: 20%; Package Quantity: 1; Packaging: Tape and Reel; Voltage Rating: 25V; Voltage Rating (DC): 25V; Termination: SMD/SMT; Voltage: 25V; Features: General Purpose; Series: CD; Construction: Cylindrical; Diameter: 10mm; Length: 10mm; Height: 10mm; Height - Seated (Max): 0.394inch; Radiation Hardening: No; RoHS Compliant: Yes; ComponentLink1URL: http://nichicon-us.com/english/products/pdfs/e-ucd.pdf?src-supplier=Digi-Key; ComponentLink1Description: http://nichicon-us.com/english/products/pdfs/e-ucd.pdf?src-supplier=Digi-Key; ComponentLink2URL: http://www.mouser.com/ds/2/293/e-cd-22158.pdf?src-supplier=Mouser; ComponentLink2Description: http://www.mouser.com/ds/2/293/e-cd-22158.pdf?src-supplier=Mouser; ComponentLink3URL: http://uk.rs-online.com/webdocs/0ebd/0900766b80ebdadd.pdf?src-supplier=RSComponents; ComponentLink3Description: http://uk.rs-online.com/webdocs/0ebd/0900766b80ebdadd.pdf?src-supplier=RSComponents; ComponentLink4URL: http://www.nichicon.co.jp/english/products/pdfs/e-cd.pdf?src-supplier=Avnet; ComponentLink4Description: http://www.nichicon.co.jp/english/products/pdfs/e-cd.pdf?src-supplier=Avnet; ComponentLink5URL: http://products.nichicon.co.jp/en/pdf/XJA043/e-cd.pdf?src-supplier=Future+Electronics; ComponentLink5Description: http://products.nichicon.co.jp/en/pdf/XJA043/e-cd.pdf?src-supplier=Future+Electronics; ComponentLink6URL: https://www.verical.com/server-webapp/html/getDatasheet?partID=512790&src-supplier=Verical; ComponentLink6Description: https://www.verical.com/server-webapp/html/getDatasheet?partID=512790&src-supplier=Verical; ComponentLink7URL: http://www.nichicon.co.jp/english/products/pdfs/e-cd.pdf?src-supplier=Avnet+Europe; ComponentLink7Description: http://www.nichicon.co.jp/english/products/pdfs/e-cd.pdf?src-supplier=Avnet+Europe; Supplier Part Number 1: 493-6386-1-ND; LCSC Part Number: C2690145
footprint UCD1E471MNL1GS_
pins: 1, 2

## UCD1H221MNL1GS
designator C?, comment 220uF
CAP ALUM 220UF 20% 50V SMD; Manufacturer: Nichicon; Manufacturer Part Number: UCD1H221MNL1GS; Ripple Current: 700mA; Impedance: 160mR; Leakage Current: 3uA; Life (Hours): 5000Hour; Dissipation Factor: 0.1%; Item Type: Capacitor; Supplier 1: Digi-Key; RoHS: Yes; Category: Aluminum Electrolytic Capacitors; Pricing 1: 1=0.85000, 10=0.60200, 50=0.45480, 100=0.39620 (USD); Mount: Surface Mount,PCB; Case/Package: Radial; Min Operating Temperature: -55°C; Max Operating Temperature: 105°C; Capacitance: 220uF; Tolerance: 20%; Voltage Rating: 50V; Packaging: Tape and Reel; Package Quantity: 1; Voltage Rating (DC): 50V; Termination: SMD/SMT; Voltage: 50V; Features: General Purpose; Series: CD; Construction: Cylindrical; Diameter: 10mm; Length: 10mm; Height: 10mm; Height - Seated (Max): 0.394inch; Radiation Hardening: No; Lead Free: Lead Free; RoHS Compliant: Yes; ComponentLink1URL: https://datasheet.ciiva.com/11776/0900766b80ebdadd-11776792.pdf?src-supplier=RSComponents; ComponentLink1Description: https://datasheet.ciiva.com/11776/0900766b80ebdadd-11776792.pdf?src-supplier=RSComponents; ComponentLink2URL: https://datasheet.ciiva.com/5362/e-cd-22158-5362489.pdf?src-supplier=Mouser; ComponentLink2Description: https://datasheet.ciiva.com/5362/e-cd-22158-5362489.pdf?src-supplier=Mouser; ComponentLink3URL: https://datasheet.ciiva.com/11684/e-cd-11684678.pdf?src-supplier=Avnet; ComponentLink3Description: https://datasheet.ciiva.com/11684/e-cd-11684678.pdf?src-supplier=Avnet; ComponentLink4URL: https://datasheet.ciiva.com/15037/e-cd-15037119.pdf?src-supplier=Digi-Key; ComponentLink4Description: https://datasheet.ciiva.com/15037/e-cd-15037119.pdf?src-supplier=Digi-Key; ComponentLink5URL: https://datasheet.ciiva.com/16393/e-cd-16393493.pdf?src-supplier=Future+Electronics; ComponentLink5Description: https://datasheet.ciiva.com/16393/e-cd-16393493.pdf?src-supplier=Future+Electronics; ComponentLink6URL: https://datasheet.ciiva.com/17354/e-cd-17354606.pdf?src-supplier=Avnet+Europe; ComponentLink6Description: https://datasheet.ciiva.com/17354/e-cd-17354606.pdf?src-supplier=Avnet+Europe; Supplier Part Number 1: 493-6390-1-ND; LCSC Part Number: C116211
footprint UCD-220uF-10mmDia (0.406" L x 0.406" W (10.30mm x 10.30mm))
pins: 1, 2

## UCR03EVPFLR100
designator R?, comment 0.1R
RES 0.1 OHM 1% 1/4W 0603; Manufacturer: Rohm; Manufacturer Part Number: UCR03EVPFLR100; Max Power Dissipation: 250mW; Resistance: 100mR; Temperature Coefficient: 150ppm/°C; Item Type: Resistor; Supplier 1: Mouser; RoHS: Yes; Category: Chip SMD Resistors; Stock 1: 9270; Pricing 1: 1=0.63000, 10=0.32200, 50=0.32200, 100=0.25700, 1000=0.14100, 10000=0.12700 (USD); Case/Package: 0603; Case Code (Metric): 1608; Case Code (Imperial): 0603; Min Operating Temperature: -55°C; Max Operating Temperature: 155°C; Features: Automotive AEC-Q200; Package Quantity: 5000; Packaging: Cut Tape; Tolerance: 1%; Power Rating: 250mW; Resistor Type: Thick Film; Number of Terminations: 2; Length: 0.063inch; Width: 0.034inch; Height: 0.024inch; Lead Free: Lead Free; ComponentLink1URL: https://datasheet.ciiva.com/14930/ucr-14930712.pdf?src-supplier=Digi-Key; ComponentLink1Description: https://datasheet.ciiva.com/14930/ucr-14930712.pdf?src-supplier=Digi-Key; ComponentLink2URL: https://datasheet.ciiva.com/14927/ucr-14927051.pdf?src-supplier=Digi-Key; ComponentLink2Description: https://datasheet.ciiva.com/14927/ucr-14927051.pdf?src-supplier=Digi-Key; Supplier Part Number 1: 755-UCR03EVPFLR100; LCSC Part Number: C880952
footprint Res-0603
pins: 1, 2

## UDD32C03L01
designator D?
15V 19A 3.3V 4V Bidirectional SOD-323 ESD Protection Devices ROHS; Manufacturer: Brightking; Manufacturer Part Number: UDD32C03L01; Item Type: ESD Diode; Footprint: SOD-323; ComponentLink1Description: LCSC; ComponentLink1URL: https://lcsc.com/product-detail/span-style-background-color-ff0-ESD-span-Protection-Devices_Brightking-Elec-TAIWAN-UDD32C03L01_C78439.html; LCSC Part Number: C78439
footprint SOD-323
pins: 1, 2

## ULN2003A
designator U?
100uA@50V 3V@2V,300mA 1.6V@350mA 4mA@12V 100uA@50V 1.25V@350mA 500mA 25pF SOP-16_150mil Darlington Transistor Arrays ROHS; Manufacturer: Mixic; Manufacturer Part Number: ULN2003A; Item Type: IC; Package: SOP-16_150mil; LCSC Part Number: C181730; ComponentLink1Description: LCSC; ComponentLink1URL: https://www.lcsc.com/product-detail/Darlington-Transistor-Arrays_Mixic-ULN2003A_C181730.html
footprint SOP-16_150mil
pins: 1 1B, 2 2B, 3 3B, 4 4B, 5 5B, 6 6B, 7 7B, 8 E, 9 COM, 10 7C, 11 6C, 12 5C, 13 4C, 14 3C, 15 2C, 16 1C